# Altium schematic symbol library CM7V-T1A-32.768KHZ-7PF-20PPM-TA-QC.SchLib: 1 symbol
Pins are listed as number, name and electrical type; pins without a type are passive.

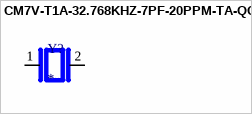
[diagram p0: symbol CM7V-T1A-32.768KHZ-7PF-20PPM-TA-QC]

## CM7V-T1A-32.768KHZ-7PF-20PPM-TA-QC
designator Y?
DiapasÃ³n de cristal de 32,768 kHz en encapsulado SMD de 1,5 x 3,2 mm; MF: Micro Crystal; MP: CM7V-T1A-32.768KHZ-7PF-20PPM-TA-QC; SnapEDA_Link: https://www.snapeda.com/parts/CM7V-T1A-32.768KHZ-7PF-20PPM-TA-QC/Micro+Crystal/view-part/?ref=snap; Package: SMD-2 Micro Crystal; Value: *; Check_prices: https://www.snapeda.com/parts/CM7V-T1A-32.768KHZ-7PF-20PPM-TA-QC/Micro+Crystal/view-part/?ref=eda
footprint XTAL_CM7V-T1A-32.768KHZ-7PF-20PPM-TA-QC
pins: 1, 2